# Altium footprint library Propia.PcbLib: 378 footprints (part 16 of 24)
Each footprint in its own frame and in the unit in brackets; x right, y up, seen from the top. Pads: shape width x height; smd on the part's side, far side on the other; paste and mask are expansions set on the pad; w line width, h text height; cw(c..) or ccw(c..) is an arc to the next point about the centre after c.
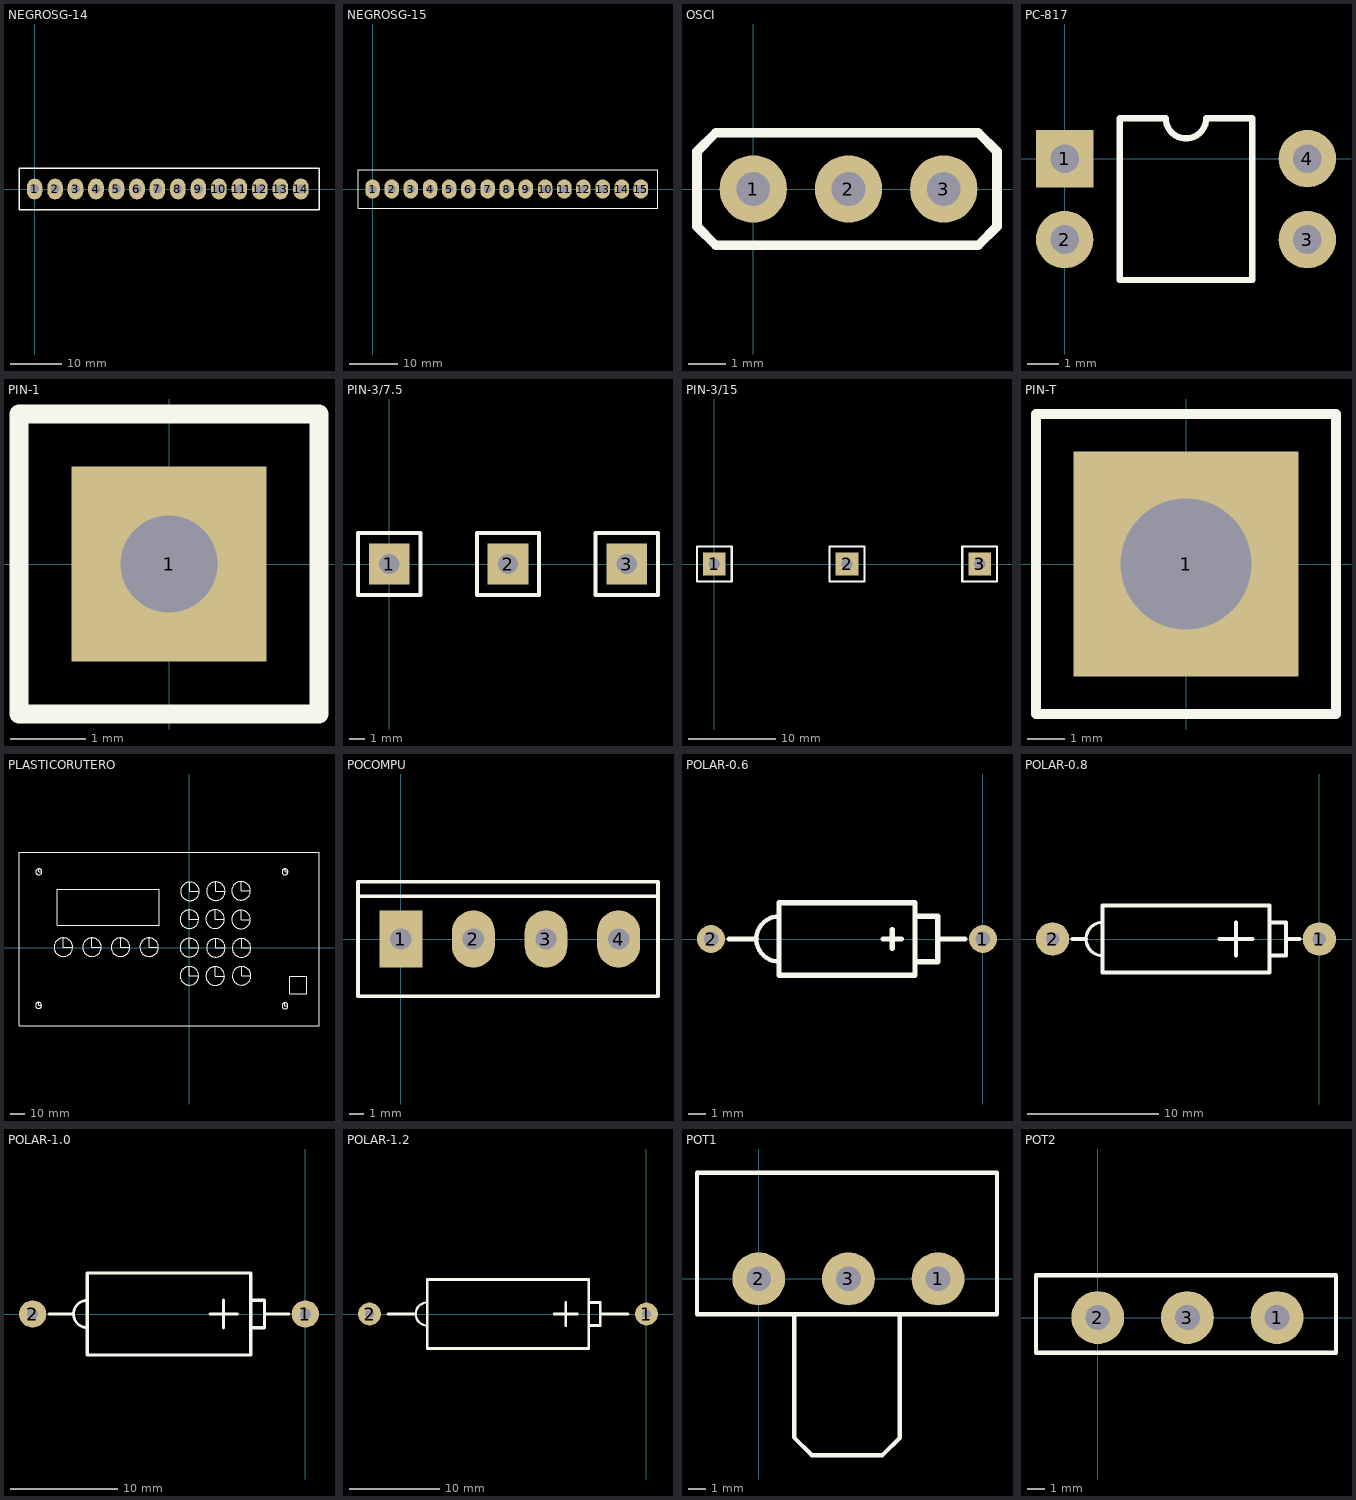
[diagram p15: the footprints below, top view; thin cyan lines are the x and y axes]

## NEGROSG-14 [mm]
pads (14):
  oval 3x4 hole 1.7: 1(0,0) 2(3.962,0) 3(7.925,0) 4(11.887,0) 5(15.85,0) 6(19.812,0) 7(23.774,0) 8(27.737,0) 9(31.699,0) 10(35.662,0) 11(39.624,0) 12(43.586,0) 13(47.549,0) 14(51.511,0)
TopOverlay:
  lines w0.254: -3,-4 -3,4 55,4 55,-4 -3,-4

## NEGROSG-15 [mm]
pads (15):
  oval 3x4 hole 1.7: 1(0,0) 2(3.962,0) 3(7.925,0) 4(11.887,0) 5(15.85,0) 6(19.812,0) 7(23.774,0) 8(27.737,0) 9(31.699,0) 10(35.662,0) 11(39.624,0) 12(43.586,0) 13(47.549,0) 14(51.511,0) 15(55.474,0)
TopOverlay:
  lines w0.254: -3,-4 -3,4 59,4 59,-4 -3,-4

## OSCI [mm]
pads (3):
  round 1.8 hole 0.9: 1(0,0) 2(2.54,0) 3(5.08,0)
TopOverlay:
  lines w0.254: -1.5,-1 -1.5,0 -1.5,1 -1,1.5 6,1.5 6.5,1 6.5,-1 6,-1.5 -1,-1.5 -1.5,-1

## PC-817 [mm]
pads (4):
  rect 1.8x1.8 hole 0.9: 1(0,0)
  round 1.8 hole 0.9: 2(0,-2.54) 3(7.62,-2.54) 4(7.62,0)
TopOverlay:
  lines w0.2: 1.735,-3.81 1.735,1.27 3.175,1.27 ccw(c3.81,1.27) 4.445,1.27 5.885,1.27 5.885,-3.81 1.735,-3.81

## PIN-1 [mm]
pads (1):
  rect 2.6x2.6 hole 1.3: 1(0,0)
TopOverlay:
  lines w0.254: -2,-2 -2,2 2,2 2,-2 -2,-2

## PIN-3/7.5 [mm]
pads (3):
  rect 2.6x2.6 hole 1.3: 1(0,0) 2(7.62,0) 3(15.24,0)
TopOverlay:
  lines w0.254: -2,-2 -2,2 2,2 2,-2 -2,-2 ; 5.62,-2 5.62,2 9.62,2 9.62,-2 5.62,-2 ; 13.24,-2 13.24,2 17.24,2 17.24,-2 13.24,-2

## PIN-3/15 [mm]
pads (3):
  rect 2.6x2.6 hole 1.3: 1(0,0) 2(15.24,0) 3(30.48,0)
TopOverlay:
  lines w0.254: -2,-2 -2,2 2,2 2,-2 -2,-2 ; 13.24,-2 13.24,2 17.24,2 17.24,-2 13.24,-2 ; 28.48,-2 28.48,2 32.48,2 32.48,-2 28.48,-2

## PIN-T [mm]
pads (1):
  rect 6x6 hole 3.5: 1(0,0)
TopOverlay:
  lines w0.254: -4,-4 4,-4 4,4 -4,4 -4,-4

## PLASTICORUTERO [mm]
TopOverlay:
  circle w0.127: c-105.551,-40.444 r2.1
  circle w0.127: c-88.168,0.3 r6.5
  circle w0.127: c-68.168,0.3 r6.5
  circle w0.127: c-48.168,0.3 r6.5
  circle w0.127: c-28.168,0.3 r6.5
  circle w0.127: c-105.348,53.057 r2.1
  circle w0.127: c66.951,53.05 r2.1
  circle w0.127: c66.947,-40.749 r2.1
  circle w0.127: c0,-19.7 r6.5
  circle w0.127: c0,0 r6.5
  circle w0.127: c0,19.9 r6.5
  circle w0.127: c0.4,39.4 r6.5
  circle w0.127: c18.1,-19.9 r6.5
  circle w0.127: c36.6,-19.7 r6.5
  circle w0.127: c18.5,-0.1 r6.5
  circle w0.127: c36.5,-0.2 r6.5
  circle w0.127: c18,20 r6.5
  circle w0.127: c36.2,19.7 r6.5
  circle w0.127: c18.5,39.5 r6.5
  circle w0.127: c36.2,39.8 r6.5
  lines w0.127: -105.551,-38.344 -105.551,-40.444 -103.451,-40.444 ; -105.348,55.157 -105.348,53.057 -103.248,53.057 ; -88.168,6.55 -88.168,0.3 -81.918,0.3 ; -68.168,6.55 -68.168,0.3 -61.918,0.3 ; -48.168,6.55 -48.168,0.3 -41.918,0.3 ; -28.168,6.55 -28.168,0.3 -21.918,0.3 ; 0,-13.45 0,-19.7 6.25,-19.7 ; 0,6.25 0,0 6.25,0 ; 0,26.15 0,19.9 6.25,19.9 ; 0.4,45.65 0.4,39.4 6.65,39.4 ; 18,26.25 18,20 24.25,20 ; 18.1,-13.65 18.1,-19.9 24.35,-19.9 ; 18.5,6.15 18.5,-0.1 24.75,-0.1 ; 18.5,45.75 18.5,39.5 24.75,39.5 ; 36.2,25.95 36.2,19.7 42.45,19.7 ; 36.2,46.05 36.2,39.8 42.45,39.8 ; 36.5,6.05 36.5,-0.2 42.75,-0.2 ; 36.6,-13.45 36.6,-19.7 42.85,-19.7 ; 66.947,-38.649 66.947,-40.749 69.047,-40.749 ; 66.951,55.15 66.951,53.05 69.051,53.05 ; -119.251,-54.545 -119.251,66.655 90.749,66.655 90.749,-54.545 -119.251,-54.545 ; -92.451,15.555 -21.251,15.555 -21.251,40.755 -92.451,40.755 -92.451,15.555 ; 70.349,-32.145 70.349,-19.845 82.149,-19.845 82.149,-32.145 70.349,-32.145

## POCOMPU [mm]
pads (4):
  rect 3x4 hole 1.5: 1(0,0)
  oval 3x4 hole 1.5: 2(5.08,0) 3(10.16,0) 4(15.24,0)
TopOverlay:
  lines w0.254: -3,3 17.9,3 ; -3,-4 -3,0 -3,4 18,4 18,-4 -3,-4

## POLAR-0.6 [mil]
pads (2):
  round 62 hole 32: 1(0,0) 2(-600,0)
TopOverlay:
  lines w10: -450,-50 cw(c-450,0) -450,50
  lines w12: -560,0 -500,0 ; -220,0 -180,0 ; -200,-20 -200,20 ; -150,-50 -100,-50 -100,50 -150,50 ; -100,0 -40,0 ; -450,-80 -450,80 -150,80 -150,-80 -450,-80

## POLAR-0.8 [mil]
pads (2):
  round 100 hole 40: 1(0,0) 2(-800,0)
TopOverlay:
  lines w10: -650,-50 cw(c-650,0) -650,50
  lines w12: -740,0 -700,0 ; -300,0 -200,0 ; -250,-50 -250,50 ; -150,-50 -100,-50 -100,50 -150,50 ; -100,0 -60,0 ; -650,-100 -150,-100 -150,100 -650,100 -650,-100

## POLAR-1.0 [mil]
pads (2):
  round 100 hole 40: 1(0,0) 2(-1000,0)
TopOverlay:
  lines w10: -800,-50 cw(c-800,0) -800,50
  lines w12: -940,0 -850,0 ; -350,0 -250,0 ; -300,-50 -300,50 ; -200,-50 -150,-50 -150,50 -200,50 ; -150,0 -60,0 ; -800,-150 -800,150 -200,150 -200,-150 -800,-150

## POLAR-1.2 [mil]
pads (2):
  round 100 hole 40: 1(0,0) 2(-1200,0)
TopOverlay:
  lines w10: -950,-50 cw(c-950,0) -950,50
  lines w12: -1120,0 -1000,0 ; -400,0 -300,0 ; -350,-50 -350,50 ; -250,-50 -200,-50 -200,50 -250,50 ; -200,0 -80,0 ; -950,-150 -950,150 -250,150 -250,-150 -950,-150

## POT1 [mm]
pads (3):
  round 3 hole 1.4: 1(10.16,0) 2(0,0) 3(5.08,0)
TopOverlay:
  lines w0.254: -3.5,0 -3.5,6 13.5,6 13.5,-2 -3.5,-2 -3.5,0.03 ; 2,-2 2,-8.99 3,-9.99 7.01,-9.99 8,-9 8,-2.03

## POT2 [mm]
pads (3):
  round 3 hole 1.4: 1(10.16,0) 2(0,0) 3(5.08,0)
TopOverlay:
  lines w0.254: -3.5,0 -3.5,2.4 13.5,2.4 13.5,-2 -3.5,-2 -3.5,0.03